# Altium schematic symbol library DIM.SCHLIB: 488 symbols (part 2 of 5)
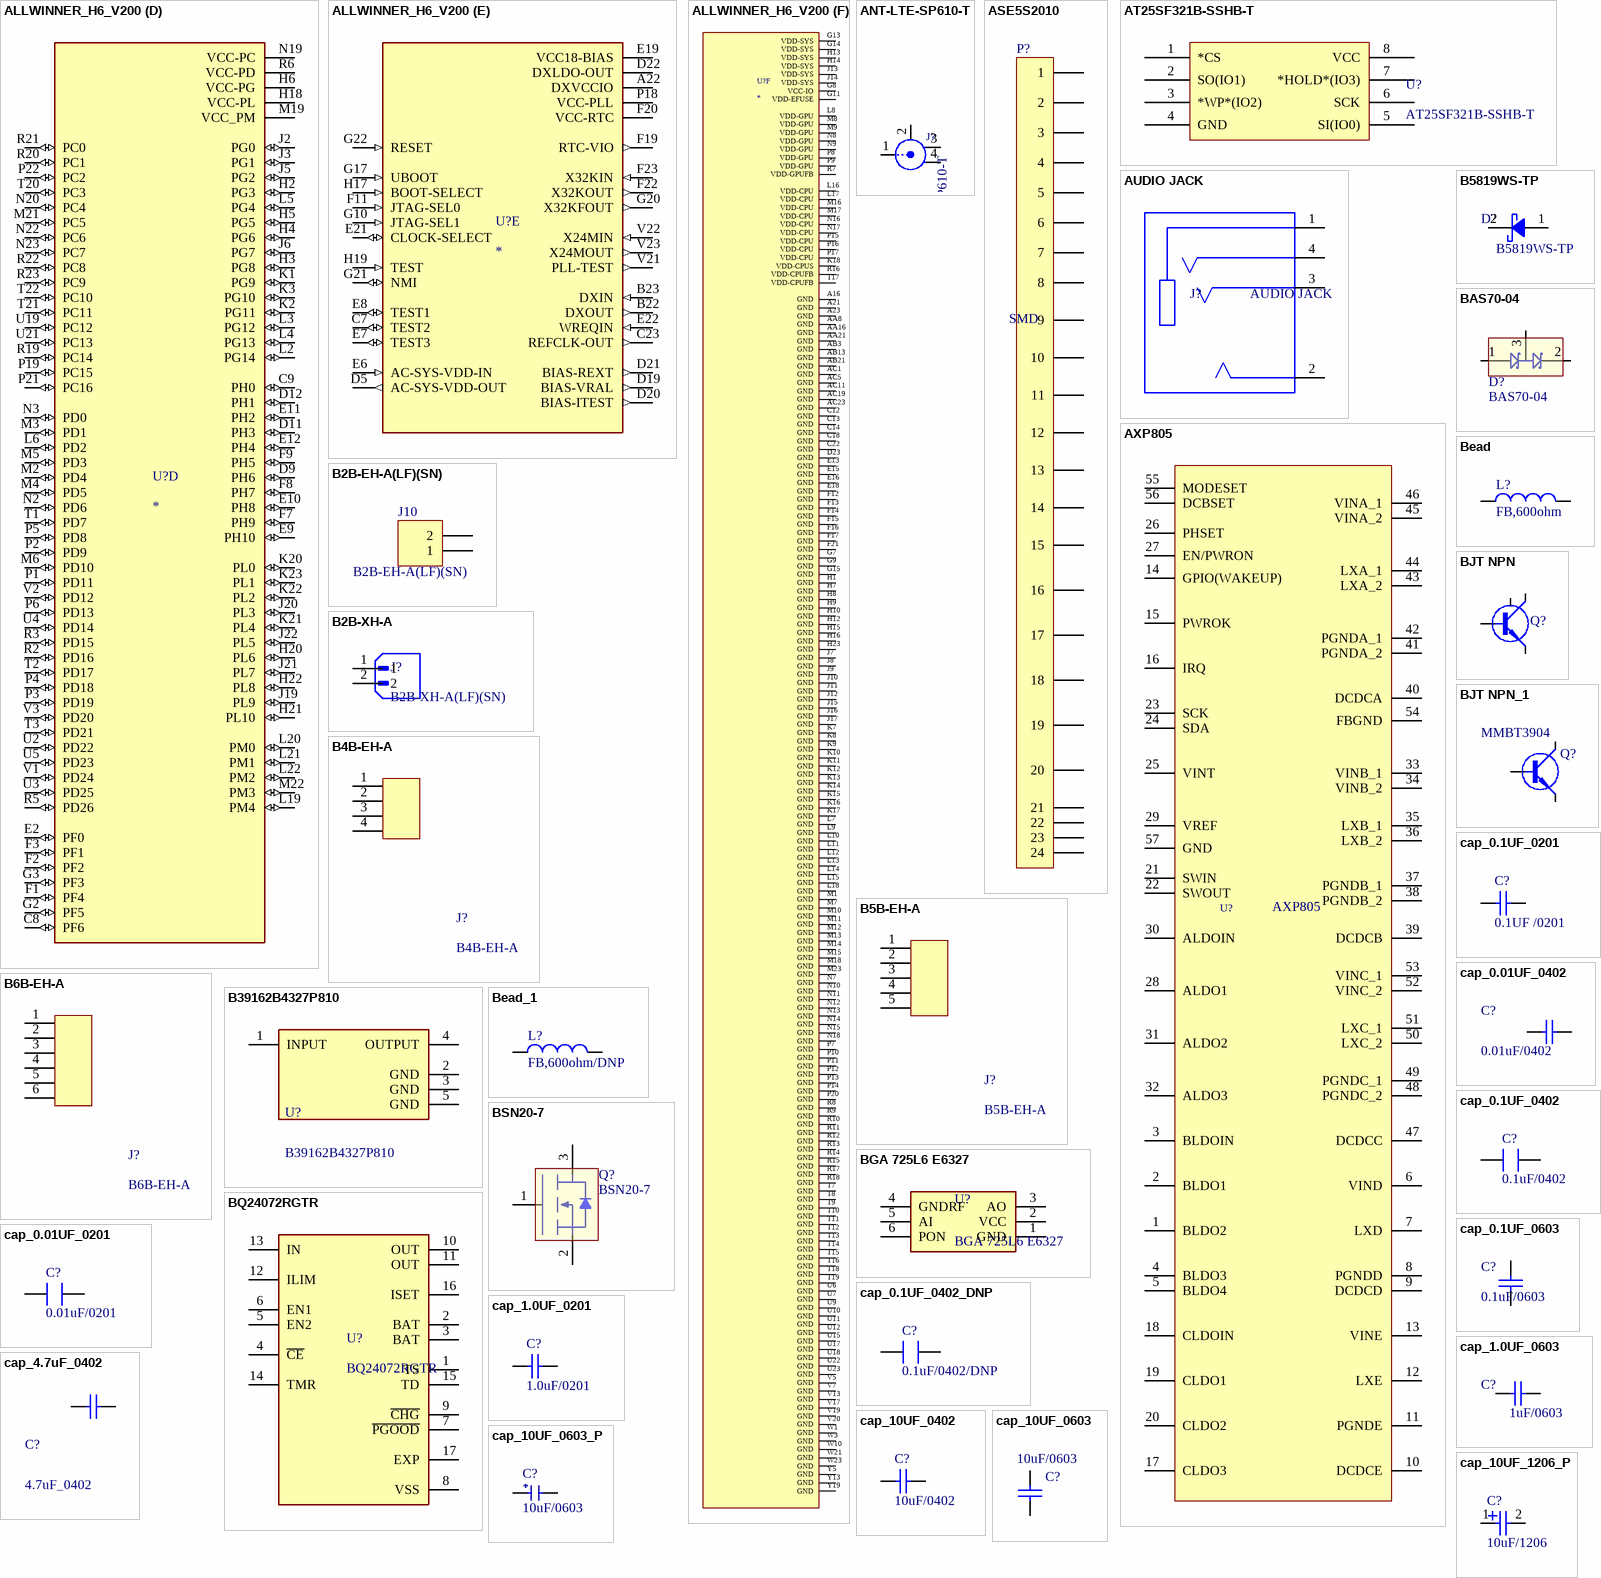
[diagram p26: symbols ALLWINNER_H6_V200 to cap_10UF_1206_P]

## AUDIO JACK
designator J?
AUDIO JACK, 3.5 MM, RT, 4 CONDUC; Manufacturer: CUI Devices; Manufacturer Part Number: SJ2-35894A-SMT-TR; Package: AUDIO JACK; Supplier: Digi-Key; Supplier Part Number: CP-SJ2-35894A-SMT-TR-ND; Value: AUDIO JACK; Operating Temperature: -55°C ~ 155°C
footprint CUI_SJ2-35894A-SMT-TR
pins: 1 SLEEVE, 2 TIP, 3 RING1, 4 RING2

## AXP805
designator U?
Manufacturer: Aliexpress; Package: SMD; Manufacturer Part Number: AXP805; Value: AXP805
pins: 1 BLDO2, 2 BLDO1, 3 BLDOIN, 4 BLDO3, 5 BLDO4, 6 VIND, 7 LXD, 8 PGNDD, 9 DCDCD, 10 DCDCE, 11 PGNDE, 12 LXE, 13 VINE, 14 GPIO(WAKEUP), 15 PWROK, 16 IRQ, 17 CLDO3, 18 CLDOIN, 19 CLDO1, 20 CLDO2, 21 SWIN, 22 SWOUT, 23 SCK, 24 SDA, 25 VINT, 26 PHSET, 27 EN/PWRON, 28 ALDO1, 29 VREF, 30 ALDOIN, 31 ALDO2, 32 ALDO3, 33 VINB_1, 34 VINB_2, 35 LXB_1, 36 LXB_2, 37 PGNDB_1, 38 PGNDB_2, 39 DCDCB, 40 DCDCA, 41 PGNDA_2, 42 PGNDA_1, 43 LXA_2, 44 LXA_1, 45 VINA_2, 46 VINA_1, 47 DCDCC, 48 PGNDC_2, 49 PGNDC_1, 50 LXC_2, 51 LXC_1, 52 VINC_2, 53 VINC_1, 54 FBGND, 55 MODESET, 56 DCBSET, 57 GND

## B2B-EH-A(LF)(SN)
designator J10
CONN HEADER EH TOP 2POS 2.5MM; Manufacturer: JST Sales America Inc.; Pitch - Mating: 0.098" (2.50mm); Style: Board to Cable/Wire; Shrouding: Shrouded - 3 Wall; Number of Positions: 2; Number of Positions Loaded: All; Contact Length - Mating: 0.130" (3.30mm); Contact Length - Post: 0.126" (3.20mm); Material Flammability Rating: UL94 V-0; Current Rating: 3A; Voltage Rating: 250V; Mated Stacking Heights: 8.1mm; Supplier 1: LCSC; RoHS: RoHS Compliant; Category: Connectors, Interconnects; Stock 1: 90599; Pricing 1: 1=0.14, 10=0.131, 100=0.0809, 500=0.06698, 1000=0.05861, 5000=0.05024, 10000=0.04884 (USD); Packaging: Bulk; Part Status: Active; Connector Type: Header; Contact Type: Male Pin; Number of Rows: 1; Row Spacing - Mating: -; Mounting Type: Through Hole; Termination: Press-Fit, Solder; Fastening Type: Friction Lock; Overall Contact Length: -; Insulation Height: 0.236" (6.00mm); Contact Shape: Square; Contact Finish - Mating: Tin; Contact Finish Thickness - Mating: -; Features: -; Ingress Protection: -; Insulation Color: Natural; Contact Finish - Post: Tin; Contact Material: Brass; Insulation Material: Polyamide (PA66), Nylon 6/6; Operating Temperature: -25°C ~ 85°C; Contact Finish Thickness - Post: -; Applications: -; ComponentLink1URL: http://www.jst-mfg.com/product/pdf/eng/eEH.pdf; ComponentLink1Description: http://www.jst-mfg.com/product/pdf/eng/eEH.pdf; Supplier Part Number 1: C160262; Manufacturer Part Number: B2B-EH-A(LF)(SN)
footprint B2B-EH-A(LF)(SN) (Footprint not found)
pins: 1, 2

## B2B-XH-A
designator J?, comment B2B-XH-A(LF)(SN)
Through Hole,P=2.5mm; MF: JST; SPN: C158012; Value: B2B-XH-A(LF)(SN); MP: B2B-XH-A(LF)(SN)
footprint JST_B2B-XH-A
pins: 1, 2

## B4B-EH-A
designator J?
CONN HEADER VERT 4POS 2.5MM; Manufacturer: JST Sales America Inc.; Manufacturer Part Number: B4B-EH-A; Package: TH; Supplier: Digi-Key; Value: B4B-EH-A
footprint B4B-EH-A_JST
pins: 1, 2, 3, 4

## B5B-EH-A
designator J?
CONN HEADER VERT 5POS 2.5MM; Manufacturer: JST Sales America Inc.; Manufacturer Part Number: B5B-EH-A; Package: TH; Supplier: Digi-Key; Supplier Part Number: 455-B5B-EH-A-ND; Value: B5B-EH-A
footprint B5B-EH-A_JST
pins: 1, 2, 3, 4, 5

## B6B-EH-A
designator J?
CONN HEADER VERT 6POS 2.5MM; Manufacturer: JST Sales America Inc.; Manufacturer Part Number: B6B-EH-A; Package: TH; Supplier: Digi-Key; Supplier Part Number: 455-1615-ND; Value: B6B-EH-A
footprint B6B-EH-A_JST
pins: 1, 2, 3, 4, 5, 6

## B5819WS-TP
designator D?
DIODE SCHOTTKY 40V 1A SOD323; Manufacturer: Micro Commercial Co; Manufacturer Part Number: B5819WS-TP; Package: SOD323; Supplier: Digi-Key; Supplier Part Number: B5819WS-TPMSTR-ND; Unit Price: 0.12865; Value: B5819WS-TP
pins: 1, 2

## B39162B4327P810
designator U?
Frequency RF SAW Filter (Sound Acoustic Wave) Bandwidth 5-SMD, No Lead; Manufacturer: Qualcomm (RF360 - A Qualcomm & TDK Joint Venture); Value: B39162B4327P810; Manufacturer Part Number: B39162B4327P810; Package: SMD; Supplier: Digi-Key; Supplier Part Number: 495-7424-2-ND; Operating Temperature: -55°C ~ 125°C; Supplier Availability: Active
footprint B39162B4327P810
pins: 1 INPUT, 2 GND (power), 3 GND (power), 4 OUTPUT, 5 GND (power)

## BAS70-04
designator D?
DIODE ARRAY SCHOTTKY 70V SOT23-3; Manufacturer Part Number: BAS70-04-7-F; Manufacturer: Diodes Incorporated; Package: SOT-23-3; Value: BAS70-04; Supplier: Digi-Key; Supplier Part Number: BAS70-04-FDICT-ND; Operating Temperature: -55°C ~ 125°C; Supplier Availability: Active
footprint BAS70-04-7-F
pins: 1, 2, 3

## Bead
designator L?, comment FB,600ohm
FERRITE BEAD 300 OHM 0805 1LN; Manufacturer: Würth Elektronik; Manufacturer Part Number: 742792031; Package: 0805 (2012 metric); Supplier: Digi-Key; Supplier Part Number: 732-4638-2-ND; Value: FB,600ohm; Operating Temperature: -55°C ~ 125°C
footprint RES 0805/2012 (Chip Resistor, 2-Leads, Body 2.00x1.25mm, IPC High Density)
pins: 1, 2

## Bead_1
designator L?, comment FB,600ohm/DNP
Ferrite Bead 600ohm 0805 2000mA; Manufacturer: Fair-Rite; Manufacturer Part Number: 2508056017Y2; Package: 0805 (2012 metric); Supplier: Mouser; Supplier Part Number: 623-2508056017Y2; Value: FB,600ohm/DNP; Operating Temperature: -55°C ~ 125°C
footprint BEAD
pins: 1, 2

## BGA 725L6 E6327
designator U?
RF Amplifier RF SILICON MMIC; Manufacturer: Infineon Technologies; Value: BGA 725L6 E6327; Manufacturer Part Number: BGA 725L6 E6327; Package: SMD; Supplier: Mouser; Supplier Part Number: 726-BGA725L6E6327
footprint BGA725L6E6327
pins: 1 GND, 2 VCC, 3 AO, 4 GNDRF, 5 AI, 6 PON

## BJT NPN
designator Q?, comment JANTX2N3700UB  (value not drawn)
Bipolar (BJT) Transistor NPN 80V 1A 500mW Surface Mount UB; Manufacturer: Microsemi Corporation; Manufacturer Part Number: JANTX2N3700UB; Package: UB; Supplier: Digi-Key; Supplier Part Number: 1086-2704-ND; Unit Price: $23.17; Value: JANTX2N3700UB
footprint 3-SMD
pins: 1 B, 2 E, 3 C, 4 S

## BJT NPN_1
designator Q?, comment MMBT3904
TRANS NPN 40V 0.2A SOT23; Manufacturer: ON Semiconductor; Manufacturer Part Number: MMBT3904LT3G; Package: SOT-23-3; Supplier: Digi-Key; Supplier Part Number: MMBT3904LT3GOSTR-ND; Value: MMBT3904
footprint MMBT3904
pins: 1 B, 2 E, 3 C

## BQ24072RGTR
designator U?
Standalone 1-cell 1.5-A linear battery charger, Power Path, 4.2-V VBAT and VOUT=VBAT + 225mV; Manufacturer: Texas Instruments; SPN: C140288; MPN: BQ24072RGTR; Package: VQFN-16; Value: BQ24072RGTR; Supplier: LCSC
pins: 1 TS, 2 BAT, 3 BAT, 4 ~{CE}, 5 EN2, 6 EN1, 7 ~{PGOOD}, 8 VSS, 9 ~{CHG}, 10 OUT, 11 OUT, 12 ILIM, 13 IN, 14 TMR, 15 TD, 16 ISET, 17 EXP

## BSN20-7
designator Q?
MOSFET MOSFET BVDSS: 41V-60 41V-60V,SOT23,3K; Manufacturer: Diodes Incorporated; Manufacturer Availability: Active; Manufacturer Part Number: BSN20-7; Package: SOT-723; Supplier Part Number: 621-BSN20-7; Supplier: Mouser; Value: BSN20-7; Operating Temperature: -55°C ~ 150°C (TJ)
pins: 1, 2, 3

## cap_0.01UF_0201
designator C?, comment 0.01uF/0201
CAP CER 10000PF 25V X7R 0201; Manufacturer: Murata Electronics; Manufacturer Part Number: GRM033R71E103KE14D; Value: 0.01uF/0201; Package: 0201 (0603 Metric); Supplier: Digi-Key; Supplier Part Number: 490-14454-2-ND; Operating Temperature: -55°C ~ 125°C
footprint CAP 0201/0603 (Chip Capacitor, 2-Leads, Body 0.60x0.30mm, IPC Medium Density)
pins: 1, 2

## cap_0.1UF_0201
designator C?, comment 0.1UF /0201
CAP CER 0.1UF 25V X6S 0201; Manufacturer: Murata Electronics; Manufacturer Part Number: GRM033C81E104KE14D; Value: 0.1UF /0201; Package: 0201 (0603 Metric); Supplier: Digi-Key; Supplier Part Number: 490-10403-2-ND
footprint CAP 0201/0603 (Chip Capacitor, 2-Leads, Body 0.60x0.30mm, IPC Medium Density)
pins: 1, 2

## cap_0.01UF_0402
designator C?, comment 0.01uF/0402
CAP CER 10000PF 50V X7R 0402; Manufacturer: Murata Electronics; Manufacturer Part Number: CC0402KRX7R9BB103; Value: 0.01uF/0402; Package: 0402 (1005 Metric); Supplier: Digi-Key; Supplier Part Number: 311-1349-2-ND; Operating Temperature: -55°C ~ 125°C
footprint CAP 0402/1005 (Chip Capacitor, 2-Leads, Body 1.02x0.51mm, IPC Medium Density)
pins: 1, 2

## cap_0.1UF_0402
designator C?, comment 0.1uF/0402
CAP CER 0.1UF 50V X7R 0402; Manufacturer: TDK Corporation; Manufacturer Part Number: CGA2B3X7R1H104K050BE; Value: 0.1uF/0402; Package: 0402 (1005 Metric); Supplier: Digi-Key; Supplier Part Number: 445-173614-1-ND; Operating Temperature: -55°C ~ 125°C
footprint CAP 0402/1005 (Chip Capacitor, 2-Leads, Body 1.02x0.51mm, IPC Medium Density)
pins: 1, 2

## cap_0.1UF_0402_DNP
designator C?, comment 0.1uF/0402/DNP
CAP CER 0.1UF 50V X7R 0402; Manufacturer: TDK Corporation; Manufacturer Part Number: CGA2B3X7R1H104K050BE; Value: 0.1uF/0402/DNP; Package: 0402 (1005 Metric); Supplier: Digi-Key; Supplier Part Number: 445-173614-1-ND; Operating Temperature: -55°C ~ 125°C
footprint CAP 0402/1005 (Chip Capacitor, 2-Leads, Body 1.02x0.51mm, IPC Medium Density)
pins: 1, 2

## cap_0.1UF_0603
designator C?, comment 0.1uF/0603
0.1uF, 50v, NP; Manufacturer: KEMET; Manufacturer Part Number: C0603C104K5RACTU; Value: 0.1uF/0603; Package: 0603 (1608 Metric); Supplier: Digi-Key; Supplier Part Number: 399-5089-1-ND
footprint CAPC1608L (Chip Capacitor, Body 1.6x0.8mm, IPC High Density)
pins: 1, 2

## cap_1.0UF_0201
designator C?, comment 1.0uF/0201
Multilayer Ceramic Capacitors MLCC - SMD/SMT 0201 1.0uF 10volts *Derate Voltage/Temp; Manufacturer: Murata Electronics; Manufacturer Part Number: GRM033C81A105ME05D; Value: 1.0uF/0201; Package: 0201 (0603 metric); Supplier: Mouser; Supplier Part Number: 81-GRM033C81A105ME5D
footprint CAP 0201/0603 (Chip Capacitor, 2-Leads, Body 0.60x0.30mm, IPC Medium Density)
pins: 1, 2

## cap_1.0UF_0603
designator C?, comment 1uF/0603
1uF, 50v, NP; Manufacturer: Taiyo Yuden; Manufacturer Part Number: UMK107AB7105KA-T; Value: 1uF/0603; Package: 0603 (1608 Metric); Supplier: Digi-Key; Supplier Part Number: 587-3247-1-ND
footprint CAPC1608L (Chip Capacitor, Body 1.6x0.8mm, IPC High Density)
pins: 1, 2

## cap_4.7uF_0402
designator C?, comment 4.7uF_0402
CAP CER 4.7UF 10V X5R 0402; Manufacturer: Yageo; Manufacturer Part Number: CC0402MRX5R6BB475; Value: 4.7uF_0402; Package: 0402 (1005 Metric); Supplier: Digi-Key; Supplier Part Number: 311-1734-2-ND; Operating Temperature: -55°C ~ 125°C
footprint CAP 0402/1005 (Chip Capacitor, 2-Leads, Body 1.02x0.51mm, IPC Medium Density)
pins: 1, 2

## cap_10UF_0402
designator C?, comment 10uF/0402
0402 (1005 Metric); Manufacturer: Murata Electronics; Manufacturer Part Number: GRM155C80J106ME11D; Value: 10uF/0402; Package: 0402 (1005 Metric); Supplier: Digi-Key; Supplier Part Number: 490-13233-2-ND
footprint CAP 0402/1005 (Chip Capacitor, 2-Leads, Body 1.02x0.51mm, IPC Medium Density)
pins: 1, 2

## cap_10UF_0603
designator C?, comment 10uF/0603
Capacitor; Manufacturer: Murata Electronics North America; Manufacturer Part Number: ZRB18AC81C106ME01L; Package: 0603; Supplier: Digikey; Supplier Part Number: 490-10986-1-ND; Temperature: -55 to 105; Value: 10uF/0603
footprint CAP 0603/1608 (Chip Capacitor, 2-Leads, Body 1.60x0.80mm, IPC High Density)
pins: 1, 2

## cap_10UF_0603_P
designator C?, comment 10uF/0603
10µF Molded Tantalum Capacitors 10V; Manufacturer: AVX Corporation; Manufacturer Part Number: TACL106K010XTA; Value: 10uF/0603; Package: 0603 (1608 Metric); Supplier: Digi-Key; Supplier Part Number: 478-8775-1-ND; Operating Temperature: -55°C ~ 125°C; Supplier Availability: Active
footprint 0603 Polar
pins: 1 +, 2 -

## cap_10UF_1206_P
designator C?, comment 10uF/1206
10uF, 20v, Tantlum, Polar; Manufacturer: AVX Corporation; Manufacturer Part Number: F931D106MAA; Value: 10uF/1206; Package: 1206 (3216 Metric); Supplier: Digi-Key; Supplier Part Number: 478-8275-1-ND
footprint CAPC3216 (Chip Capacitor, Body 3.2x1.6mm, IPC High Density)
pins: 1, 2

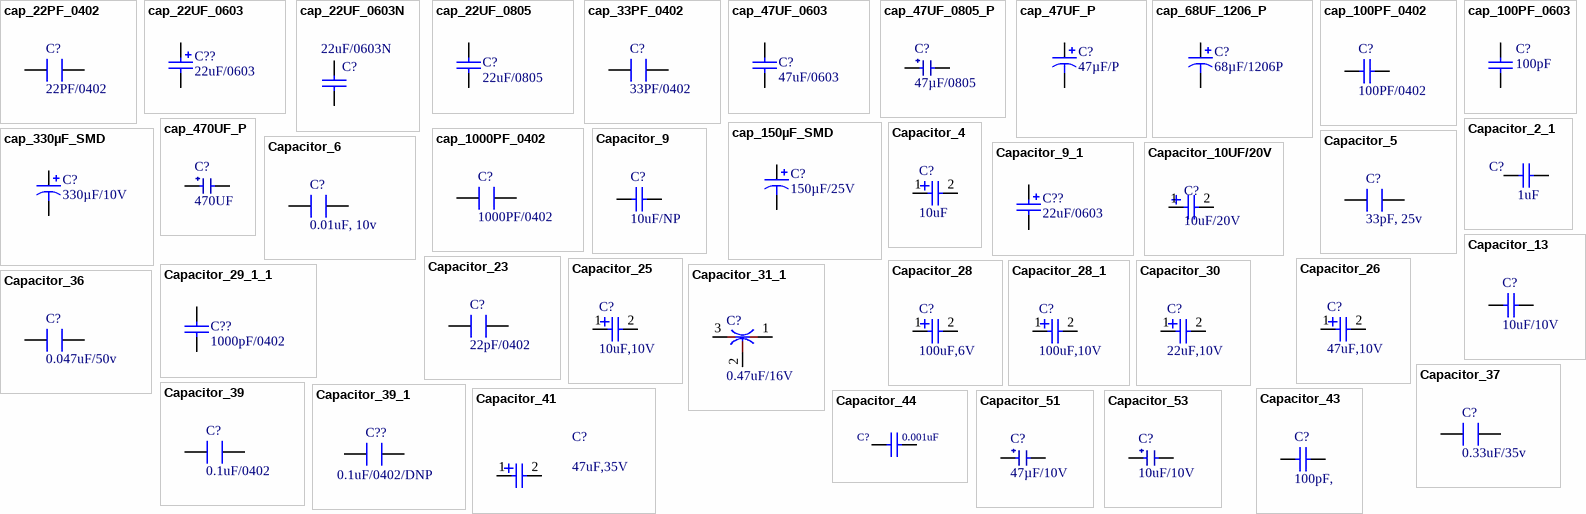
[diagram p5: symbols cap_22PF_0402 to Capacitor_53]

## cap_22PF_0402
designator C?, comment 22PF/0402
CAP CER 22PF 50V C0G/NP0 0402; Manufacturer: KEMET; Manufacturer Part Number: C0402C220K5GACTU; Value: 22PF/0402; Package: 0402 (1005 Metric); Supplier: Digi-Key; Supplier Part Number: 399-7775-2-ND; Operating Temperature: -55°C ~ 125°C
footprint CAP 0402/1005 (Chip Capacitor, 2-Leads, Body 1.02x0.51mm, IPC Medium Density)
pins: 1, 2

## cap_22UF_0603
designator C??, comment 22uF/0603
CAP TANT 22UF 20% 10V 0603; Manufacturer Part Number: F981A226MMALZT; Manufacturer: AVX Corporation; Package: 0603 (1608 Metric); Supplier Part Number: 478-10724-2-ND; Supplier: Digi-Key; Operating Temperature: -55°C ~ 125°C; Value: 22uF/0603
footprint CAPC1608L (Chip Capacitor, Body 1.6x0.8mm, IPC High Density)
pins: 1, 2
1 alternate drawing of the same symbol

## cap_22UF_0603N
designator C?, comment 22uF/0603N
Capacitor; Manufacturer: Murata Electronics; Manufacturer Part Number: ZRB18AR60J476ME01L; Package: 0603 (1608 metric); Supplier: Mouser; Supplier Part Number: 81-ZRB18AR60J476ME1L; Temperature: -55°C ~ 85°C; Value: 22uF/0603N
footprint CAP 0603/1608 (Chip Capacitor, 2-Leads, Body 1.60x0.80mm, IPC High Density)
pins: 1, 2

## cap_22UF_0805
designator C?, comment 22uF/0805
Capacitor; Manufacturer: Samsung Electro-Mechanics; Manufacturer Part Number: CL21A226MAQNNNE; Package: 0805 (2012 Metric); Supplier: Digikey; Supplier Part Number: 1276-2908-2-ND; Temperature: -55°C ~ 85°C; Value: 22uF/0805
footprint RESC2012L (Chip Resistor, Body 2.0x1.3mm, IPC High Density)
pins: 1, 2

## cap_33PF_0402
designator C?, comment 33PF/0402
33pF, 25v, NP; Manufacturer: Yageo; Manufacturer Part Number: CC0402JRNPO9BN330; Value: 33PF/0402; Package: 0402 (1005 Metric); Supplier: Digi-Key; Supplier Part Number: 311-1020-2-ND; Operating Temperature: -55°C ~ 125°C
footprint CAP 0402/1005 (Chip Capacitor, 2-Leads, Body 1.02x0.51mm, IPC Medium Density)
pins: 1, 2

## cap_47UF_0603
designator C?, comment 47uF/0603
Capacitor; Manufacturer: Murata Electronics; Manufacturer Part Number: ZRB18AR60J476ME01L; Package: 0603 (1608 metric); Supplier: Mouser; Supplier Part Number: 81-ZRB18AR60J476ME1L; Temperature: -55°C ~ 85°C; Value: 47uF/0603
footprint CAPC1608L (Chip Capacitor, Body 1.6x0.8mm, IPC High Density)
pins: 1, 2

## cap_47UF_0805_P
designator C?, comment 47µF/0805
CAP TANT 47UF 10V 20% 0805; Manufacturer: AVX Corporation; Manufacturer Part Number: F981A476MSA; Value: 47µF/0805; Package: 0805 (2012 Metric); Supplier: Digi-Key; Supplier Part Number: 478-8652-2-ND; Operating Temperature: -55°C ~ 125°C; Supplier Availability: Active
footprint CAPC2012-P (Chip Capacitor, Body 2.0x1.3mm, IPC High Density)
pins: 1 +, 2 -

## cap_47UF_P
designator C?, comment 47µF/P
CAP TANT 47UF 20% 10V 0805; Manufacturer: AVX Corporation; Manufacturer Part Number: TLNN476M010R6000; Package: 0805 (2012 Metric); Supplier: Digi-Key; Supplier Part Number: 478-6613-1-ND; Temperature: -40°C ~ 105°C; Value: 47µF/P
footprint CAP 0805/2012 -P (Chip Capacitor, 2-Leads, Body 2.00x1.20mm, IPC High Density)
pins: 1, 2
1 alternate drawing of the same symbol

## cap_68UF_1206_P
designator C?, comment 68µF/1206P
CAP TANT 68UF 20% 10V 1206; Manufacturer: AVX Corporation; Manufacturer Part Number: TLJA686M010R1500; Package: SMD/SMT; Supplier: Digi-Key; Supplier Part Number: 478-4925-6-ND; Temperature: -55°C ~  125°C; Value: 68µF/1206P
footprint CAP 1206/3216-P (Chip Capacitor, 2-Leads, Body 3.25x1.60mm, IPC Medium Density)
pins: 1, 2
1 alternate drawing of the same symbol

## cap_100PF_0402
designator C?, comment 100PF/0402
CAP CER 100PF 25V C0G/NP0 0402; Manufacturer: KEMET; Manufacturer Part Number: C0402C101J3GACTU; Value: 100PF/0402; Package: 0402 (1005 Metric); Supplier: Digi-Key; Supplier Part Number: 399-1022-2-ND
footprint CAP 0402/1005 (Chip Capacitor, 2-Leads, Body 1.02x0.51mm, IPC Medium Density)
pins: 1, 2

## cap_100PF_0603
designator C?, comment value 100pF  (hidden comment: Capacitor)
Manufacturer: Murata Electronics North America; Manufacturer Part Number: GRM1885C1H101JA01D; Package: 0603 (1608 Metric); Supplier: DigiKey; Supplier Part Number: 490-1427-2-ND; Temperature: -55°C ~ 125°C
footprint CAP 0603/1608 (Chip Capacitor, 2-Leads, Body 1.60x0.80mm, IPC High Density)
pins: 1, 2

## cap_150µF_SMD
designator C?, comment 150µF/25V
CAP ALUM 150UF 20% 25V SMD; Manufacturer: KEMET; Manufacturer Part Number: EDT157M025S9MAA; Value: 150µF/SMD; Package: Radial, Can - SMD; Supplier: Digi-Key; Supplier Part Number: EDT157M025S9MAA-ND; Temperature: -40°C ~ 125°C
pins: 1, 2
1 alternate drawing of the same symbol

## cap_330µF_SMD
designator C?, comment 330µF/10V
Polarized Capacitor (Axial); Manufacturer: KEMET; Manufacturer Part Number: EDT337M010S9MAA; Value: 330µF/SMD; Package: Radial, Can - SMD; Supplier: Digi-Key; Supplier Part Number: 493-2145-2-ND; Temperature: -40°C ~ 125°C
pins: 1, 2
1 alternate drawing of the same symbol

## cap_470UF_P
designator C?, comment 470UF
CAP ALUM 470UF 20% 10V SMD; Manufacturer: Panasonic Electronic Components; Manufacturer Part Number: EEE-FTA471XAP; Value: 470UF; Package: 0.260" L x 0.260" W (6.60mm x 6.60mm); Supplier: Digi-Key; Supplier Part Number: P15094TR-ND; Operating Temperature: -55°C ~ 125°C
pins: 1 +, 2 -

## cap_1000PF_0402
designator C?, comment 1000PF/0402
CAP CER 1000PF 16V X7R 0402; Manufacturer: Yageo; Manufacturer Part Number: CC0402KRX7R7BB102; Value: 1000PF/0402; Package: 0402 (1005 Metric); Supplier: Digi-Key; Supplier Part Number: 311-1352-2-ND; Operating Temperature: -55°C ~ 125°C
footprint CAP 0402/1005 (Chip Capacitor, 2-Leads, Body 1.02x0.51mm, IPC Medium Density)
pins: 1, 2

## Capacitor_2_1
designator C?, comment 1uF
1uF, 50v, NP; Manufacturer: Taiyo Yuden; Manufacturer Part Number: UMK107AB7105KA-T; Value: 1uF; Package: 0603 (1608 Metric); Supplier: Digi-Key; Supplier Part Number: 587-3247-1-ND
footprint CAPC1608L (Chip Capacitor, Body 1.6x0.8mm, IPC High Density)
pins: 1, 2

## Capacitor_4
designator C?, comment 10uF
10uF, 20v, Tantlum, Polar; Manufacturer: AVX Corporation; Manufacturer Part Number: F931D106MAA; Value: 10uF; Package: 1206 (3216 Metric); Supplier: Digi-Key; Supplier Part Number: 478-8275-1-ND
footprint CAPC3216 (Chip Capacitor, Body 3.2x1.6mm, IPC High Density)
pins: 1, 2

## Capacitor_5
designator C?, comment 33pF, 25v
33pF, 25v, NP; Manufacturer: AVX; Manufacturer Part Number: 06033A330FAT2A; Value: 33pF, 25v; Package: 0603 (1608 metric); Supplier: Mouser; Supplier Part Number: 581-06033A330FAT2A; Operating Temperature: -55°C ~ 125°C
footprint CAPC1608L (Chip Capacitor, Body 1.6x0.8mm, IPC High Density)
pins: 1, 2

## Capacitor_6
designator C?, comment 0.01uF, 10v
0.01uF, 10v, NP; Manufacturer: AVX; Manufacturer Part Number: 0603ZC103KAT2A; Value: 0.01uF, 10v; Package: 0603 (1608 metric); Supplier: Mouser; Supplier Part Number: 581-0603ZC103K; Operating Temperature: -55°C ~ 125°C
footprint CAPC1608L (Chip Capacitor, Body 1.6x0.8mm, IPC High Density)
pins: 1, 2

## Capacitor_9
designator C?, comment 10uF/NP
10uF, 6.3v, NP; Manufacturer: Murata Electronics; Manufacturer Part Number: GRM21BR70J106KA73L; Value: 10uF/NP; Package: 0805 (2012 metric); Supplier: Mouser; Supplier Part Number: 81-GRM21BR70J106KA3L
footprint CAPC2012 (Chip Capacitor, Body 2.0x1.3mm, IPC High Density)
pins: 1, 2

## Capacitor_9_1
designator C??, comment 22uF/0603
CAP TANT 22UF 20% 10V 0603; Manufacturer Part Number: F981A226MMALZT; Manufacturer: AVX Corporation; Package: 0603 (1608 Metric); Supplier Part Number: 478-10724-2-ND; Supplier: Digi-Key; Operating Temperature: -55°C ~ 125°C; Value: 22uF/0603
footprint CAPC1608L (Chip Capacitor, Body 1.6x0.8mm, IPC High Density)
pins: 1, 2
1 alternate drawing of the same symbol

## Capacitor_10UF/20V
designator C?, comment 10uF/20V
CAP TANT 10UF 20% 20V 1206; Manufacturer: KEMET; Manufacturer Part Number: T494A106M020AT; Value: 10uF/20V; Package: 1206 (3216 Metric); Supplier: Digikey; Supplier Part Number: 399-5157-2-ND
footprint CAPC3216 (Chip Capacitor, Body 3.2x1.6mm, IPC High Density)
pins: 1, 2

## Capacitor_13
designator C?, comment 10uF/10V
10uF, 10v; Manufacturer Part Number: C0805C106M8RACTU; Manufacturer: KEMET; Value: 10uF/10V; Package: 0805 (2012 Metric); Supplier Part Number: 399-7413-6-ND; Supplier: Digi-Key
footprint CAPC2012 (Chip Capacitor, Body 2.0x1.3mm, IPC High Density)
pins: 1, 2

## Capacitor_23
designator C?, comment 22pF/0402
CAP CER 22PF 50V C0G/NP0 0402; Manufacturer: KEMT; Manufacturer Part Number: C0402C220K5GACTU; Value: 22pF/0402; Package: 0603 (1608 Metric); Supplier: Digi-Key; Supplier Part Number: 399-7775-2-ND; Operating Temperature: -55°C ~ 125°C
footprint CAPC1005L (Chip Capacitor, Body 1.0x0.5mm, IPC High Density)
pins: 1, 2

## Capacitor_25
designator C?, comment 10uF,10V
Tantalum Capacitors - Solid SMD 10volts 10uF 20%; Manufacturer: AVX Corporation; Manufacturer Part Number: TPSP106M010R2000; Value: 10uF,10V; Package: 0805 (2012 metric); Supplier: Mouser; Supplier Part Number: 581-TPSP106M010R2000
footprint CAPC2012-P (Chip Capacitor, Body 2.0x1.3mm, IPC High Density)
pins: 1, 2

## Capacitor_26
designator C?, comment 47uF,10V
Tantalum Capacitors - Solid SMD 10volts 47uF 20% ESR=3200; Manufacturer: AVX Corporation; Manufacturer Part Number: TLJR476M010R3200; Value: 47uF,10V; Package: 0805 (2012 metric); Supplier: Mouser; Supplier Part Number: 581-TLJR476M10R3200
footprint CAPC2012-P (Chip Capacitor, Body 2.0x1.3mm, IPC High Density)
pins: 1, 2

## Capacitor_28
designator C?, comment 100uF,6V
Tantalum Capacitors - Solid SMD 6V 100uF 20% ESR = 5400mOhm; Manufacturer: AVX Corporation; Manufacturer Part Number: TLJP107M006S5400; Value: 100uF,6V; Package: 0805 (2012 metric); Supplier: Mouser; Supplier Part Number: 581-TLJP107M006S5400
footprint CAPC2012-P (Chip Capacitor, Body 2.0x1.3mm, IPC High Density)
pins: 1, 2

## Capacitor_28_1
designator C?, comment 100uF,10V
CAP TANT 100UF 10V 20% 1206; Manufacturer: AVX Corporation; Manufacturer Part Number: TLJA107M010R1400; Value: 100uF,10V; Package: 1206 (3216 metric); Supplier: Digi-Key; Supplier Part Number: 478-5651-1-ND
footprint CAPC3216 (Chip Capacitor, Body 3.2x1.6mm, IPC High Density)
pins: 1, 2

## Capacitor_29_1_1
designator C??, comment 1000pF/0402
CAP CER 1000PF 50V X7R 0402; Manufacturer: Yageo; Manufacturer Part Number: CC0402KRX7R9BB102; Value: 1000pF/0402; Package: 0402 (1005 Metric); Supplier: Digi-Key; Supplier Part Number: 311-1036-2-ND; Operating Temperature: -55°C ~ 125°C
footprint CAPC1005L (Chip Capacitor, Body 1.0x0.5mm, IPC High Density)
pins: 1, 2

## Capacitor_30
designator C?, comment 22uF,10V
Tantalum Capacitors - Solid SMD 10volts 22uF 20% ESR=3800; Manufacturer: AVX Corporation; Manufacturer Part Number: TLJN226M010R3800; Value: 22uF,10V; Package: 0805 (2012 Metric); Supplier: Mouser; Supplier Part Number: 581-TLJN226M010R3800
footprint CAPC2012-P (Chip Capacitor, Body 2.0x1.3mm, IPC High Density)
pins: 1, 2

## Capacitor_31_1
designator C?, comment 0.47uF/16V
FEEDTHRU 0.47UF 16V; Manufacturer: Murata Electronics North America; Manufacturer Part Number: NFM21PC474R1C3D; Value: 0.47uF/16V; Package: 0805 (2012 Metric), 3 PC Pad; Supplier: Digi-Key; Supplier Part Number: 490-2537-1-ND; Operating Temperature: -55°C ~ 125°C
footprint NFM21PC
pins: 1, 2, 3

## Capacitor_36
designator C?, comment 0.047uF/50v
0.047uF/50v/NP; Manufacturer: KEMET; Manufacturer Part Number: C0603C473J5RACTU; Value: 0.047uF/50v; Package: 0603 (1608 Metric); Supplier: Digi-Key; Supplier Part Number: 399-7930-1-ND; Operating Temperature: -55°C ~ 125°C
footprint CAPC1608L (Chip Capacitor, Body 1.6x0.8mm, IPC High Density)
pins: 1, 2

## Capacitor_37
designator C?, comment 0.33uF/35v
0.33uF/35v/NP; Manufacturer: TDK Corporation; Manufacturer Part Number: CGA3E1X7R1V334K080AC; Value: 0.33uF/35v; Package: 0603 (1608 Metric); Supplier: Digi-Key; Supplier Part Number: 445-6927-1-ND; Operating Temperature: -55°C ~ 125°C
footprint CAPC1608L (Chip Capacitor, Body 1.6x0.8mm, IPC High Density)
pins: 1, 2

## Capacitor_39
designator C?, comment 0.1uF/0402
CAP CER 0.1UF 50V X7R 0402; Manufacturer: TDK Corporation; Manufacturer Part Number: CGA2B3X7R1H104K050BE; Value: 0.1uF/0402; Package: 0402 (1005 Metric); Supplier: Digi-Key; Supplier Part Number: 445-173614-1-ND; Operating Temperature: -55°C ~ 125°C
footprint CAPC1005L (Chip Capacitor, Body 1.0x0.5mm, IPC High Density)
pins: 1, 2

## Capacitor_39_1
designator C??, comment 0.1uF/0402/DNP
CAP CER 0.1UF 50V X7R 0402; Manufacturer: TDK Corporation; Manufacturer Part Number: CGA2B3X7R1H104K050BE; Value: 0.1uF/0402/DNP; Package: 0402 (1005 Metric); Supplier: Digi-Key; Supplier Part Number: 445-173614-1-ND; Operating Temperature: -55°C ~ 125°C
footprint CAPC1005L (Chip Capacitor, Body 1.0x0.5mm, IPC High Density)
pins: 1, 2

## Capacitor_41
designator C?, comment 47uF,35V
CAP TANT 47UF 35V 10% 2917; Manufacturer: AVX Corporation; Manufacturer Part Number: TPSE476K035R0200; Value: 47uF,35V; Package: 2917 (7343 Metric); Supplier: Digi-Key; Supplier Part Number: 478-3109-2-ND
footprint CAPC2917
pins: 1, 2

## Capacitor_43
designator C?, comment 100pF,
CAP CER 100PF 25V C0G/NP0 0402; Manufacturer: KEMET; Manufacturer Part Number: C0402C101J3GACTU; Value: 100pF,; Package: 0402 (1005 Metric); Supplier: Digi-Key; Supplier Part Number: 399-1022-2-ND
footprint CAPC1005L (Chip Capacitor, Body 1.0x0.5mm, IPC High Density)
pins: 1, 2

## Capacitor_44
designator C?, comment 0.001uF
CAP CER 1000PF 50V X7R 0603; Manufacturer: Murata Electronics North America; Manufacturer Part Number: GCM155R71H102KA37D; Package: 0402 (1005 Metric); Supplier: DigiKey; Supplier Part Number: 490-4761-2-ND; Temperature: -55°C ~ 125°C; Value: 0.001uF
footprint CAPC1005L (Chip Capacitor, Body 1.0x0.5mm, IPC High Density)
pins: 1, 2

## Capacitor_51
designator C?, comment 47µF/10V
CAP TANT 47UF 10V 20% 0805; Manufacturer: AVX Corporation; Manufacturer Part Number: F981A476MSA; Value: 47µF/10V; Package: 0805 (2012 Metric); Supplier: Digi-Key; Supplier Part Number: 478-8652-2-ND; Operating Temperature: -55°C ~ 125°C; Supplier Availability: Active
footprint CAPC2012-P (Chip Capacitor, Body 2.0x1.3mm, IPC High Density)
pins: 1 +, 2 -

## Capacitor_53
designator C?, comment 10uF/10V
10µF Molded Tantalum Capacitors 10V; Manufacturer: AVX Corporation; Manufacturer Part Number: TACL106K010XTA; Value: 10uF/10V; Package: 0603 (1608 Metric); Supplier: Digi-Key; Supplier Part Number: 478-8775-1-ND; Operating Temperature: -55°C ~ 125°C; Supplier Availability: Active
footprint 0603 Polar
pins: 1 +, 2 -

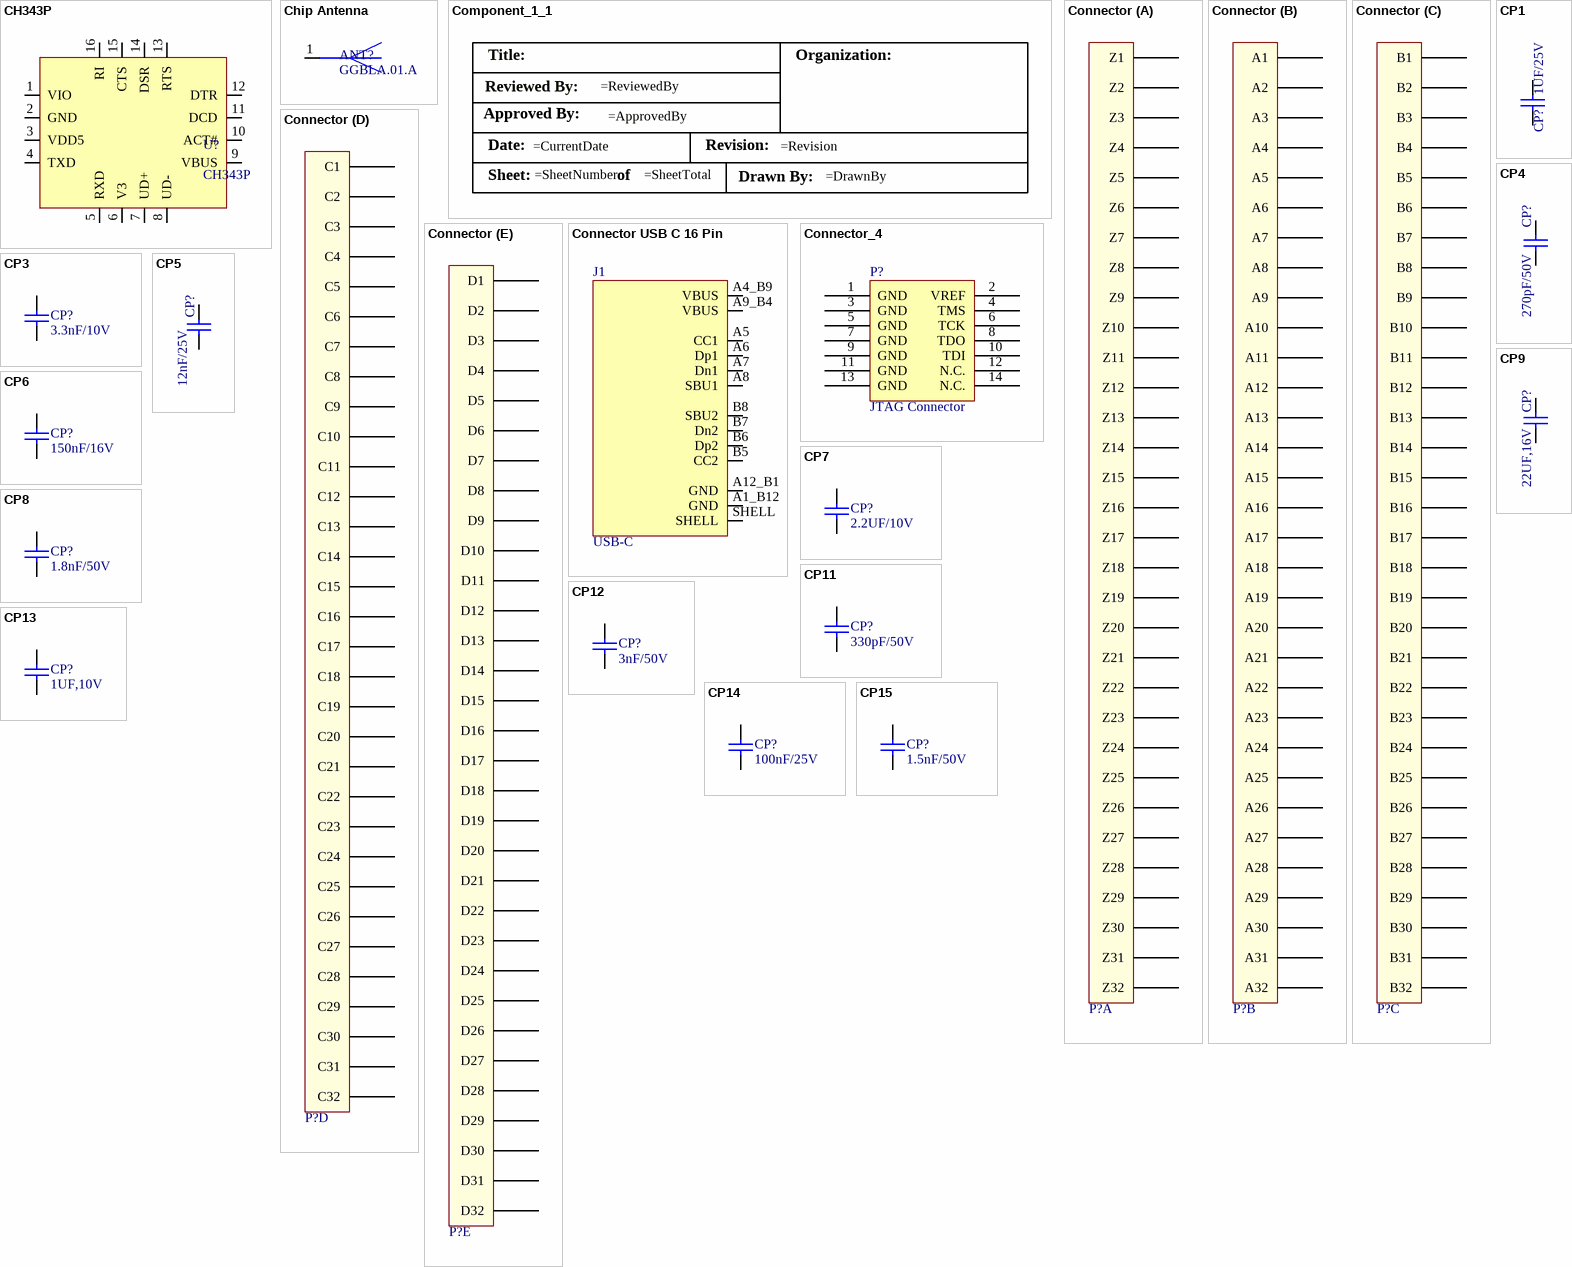
[diagram p6: symbols CH343P to CP15]

## CH343P
designator U?
TQFN-16-EP(3x3) USB ICs ROHS; Manufacturer: WCH(Jiangsu Qin Heng); SPN: C2846043; MPN: CH343P; Package: TQFN-16; Supplier: LCSC; Value: CH343P
pins: 1 VIO, 2 GND, 3 VDD5, 4 TXD, 5 RXD, 6 V3, 7 UD+, 8 UD-, 9 VBUS, 10 ACT#, 11 DCD, 12 DTR, 13 RTS, 14 DSR, 15 CTS, 16 RI

## Chip Antenna
designator ANT?, comment GGBLA.01.A
RF ANT 1.561GHZ/1.575GHZ CHIP; Manufacturer: Taoglas Limited; Manufacturer Part Number: GGBLA.01.A; package: SMD; Supplier: Digikey; Supplier Part Number: 931-1301-2-ND; Temperature: -55 to 155; value: GGBLA.01.A
footprint GGBLA.01.A
pins: 1

## Component_1_1
designator *?, comment Component_1  (value not drawn)
text: Title:; Organization:; Reviewed By:; Approved By:; Date:; Revision:; Sheet:; of; Drawn By:

## Connector
designator P?, comment VME Connector  (value not drawn)
VME_5x32; Manufacturer: HARTING; Manufacturer Part Number: 02011602101; Value: VME Connector; Supplier: Mouser; Supplier Part Number: 617-02-01-160-2101; Package: Non Standard; Operating Temperature: -55°C ~ 125°C
footprint 160M-RT-ANGLE
part A pins: Z1, Z2, Z3, Z4, Z5, Z6, Z7, Z8, Z9, Z10, Z11, Z12, Z13, Z14, Z15, Z16, Z17, Z18, Z19, Z20, Z21, Z22, Z23, Z24, Z25, Z26, Z27, Z28, Z29, Z30, Z31, Z32
part B pins: A1, A2, A3, A4, A5, A6, A7, A8, A9, A10, A11, A12, A13, A14, A15, A16, A17, A18, A19, A20, A21, A22, A23, A24, A25, A26, A27, A28, A29, A30, A31, A32
part C pins: B1, B2, B3, B4, B5, B6, B7, B8, B9, B10, B11, B12, B13, B14, B15, B16, B17, B18, B19, B20, B21, B22, B23, B24, B25, B26, B27, B28, B29, B30, B31, B32
part D pins: C1, C2, C3, C4, C5, C6, C7, C8, C9, C10, C11, C12, C13, C14, C15, C16, C17, C18, C19, C20, C21, C22, C23, C24, C25, C26, C27, C28, C29, C30, C31, C32
part E pins: D1, D2, D3, D4, D5, D6, D7, D8, D9, D10, D11, D12, D13, D14, D15, D16, D17, D18, D19, D20, D21, D22, D23, D24, D25, D26, D27, D28, D29, D30, D31, D32

## Connector USB C 16 Pin
designator J1, comment USB-C
3A 1 Surface Mount，Right Angle 16P Female -40℃~+85℃ Gold Copper Type-C SMD USB Connectors ROHS; MPN: TYPEC-304-ACP16; Manufacturer: XUNPU; SPN: C2982555; Supplier: LCSC; Value: USB-C
footprint USB-C-SMD_TYPE-C-16P-1
pins: A1_B12 GND, A4_B9 VBUS, A5 CC1, A6 Dp1, A7 Dn1, A8 SBU1, A9_B4 VBUS, A12_B1 GND, B5 CC2, B6 Dp2, B7 Dn2, B8 SBU2, SHELL

## Connector_4
designator P?, comment JTAG Connector
JTAG-FPGA; Manufacturer: Sullins Connector Solutions; Manufacturer Part Number: SBH11-PBPC-D07-ST-BK; Value: JTAG Connector; Supplier: Digi-Key; Supplier Part Number: S9170-ND; Package: SMD
footprint JATG-14_SMD (Manufacturing No:61201420621)
pins: 1 GND, 2 VREF, 3 GND, 4 TMS, 5 GND, 6 TCK, 7 GND, 8 TDO, 9 GND, 10 TDI, 11 GND, 12 N.C., 13 GND, 14 N.C.

## CP1
designator CP?, comment 1UF/25V
CAP CER 1UF 25V X7R 0805; Manufacturer: Murata Electronics North America; Manufacturer Part Number: GRM219R71E105KA88D; Package: 0805 (2012 Metric); Supplier: Digi-Key; Supplier Part Number: 490-5899-1-ND; Unit Price: *; Value: 1UF/25V
footprint CAPC2012 (Chip Capacitor, Body 2.0x1.3mm, IPC High Density)
pins: 1, 2

## CP3
designator CP?, comment 3.3nF/10V
3.3nF/10V/X7R; Manufacturer: Wurth Electronics Inc.; Manufacturer Part Number: 885012006016; Package: 0603 (1608 Metric); Supplier: Digi-Key; Supplier Part Number: 732-7759-6-ND; Unit Price: *; Value: 3.3nF/10V
footprint CAPC1608L (Chip Capacitor, Body 1.6x0.8mm, IPC High Density)
pins: 1, 2

## CP4
designator CP?, comment 270pF/50V
CAP CER 270PF 50V C0G/NP0 0805; Manufacturer: Samsung Electro-Mechanics; Manufacturer Part Number: CL21C271JBANFNC; Package: 0805 (2012 Metric); Supplier: Digi-Key; Supplier Part Number: 1276-2626-1-ND; Unit Price: *; Value: 270pF/50V
footprint CAPC2012 (Chip Capacitor, Body 2.0x1.3mm, IPC High Density)
pins: 1, 2

## CP5
designator CP?, comment 12nF/25V
CAP CER 0.012UF 25V C0G/NP0 0603; Manufacturer: KEMET; Manufacturer Part Number: C0603C123J3GACTU; Package: 0603 (1608 Metric); Supplier: Digi-Key; Supplier Part Number: 399-8997-1-ND; Unit Price: *; Value: 12nF/25V
footprint CAPC1608L (Chip Capacitor, Body 1.6x0.8mm, IPC High Density)
pins: 1, 2

## CP6
designator CP?, comment 150nF/16V
Multilayer Ceramic Capacitors MLCC - SMD/SMT 0805 0.15uF 16volts X7R 10%; Manufacturer: Murata Electronics; Manufacturer Part Number: GRM21BR71C154KA01L; Package: 0805 (2012 metric); Supplier: Mouser; Supplier Part Number: 81-GRM40X154K16L; Unit Price: *; Value: 150nF/16V
footprint CAPC2012 (Chip Capacitor, Body 2.0x1.3mm, IPC High Density)
pins: 1, 2

## CP7
designator CP?, comment 2.2UF/10V
CAP CER 2.2UF 10V X7R 0805; Manufacturer: Murata Electronics North America; Manufacturer Part Number: GRM21BR71A225KA01L; Package: 0805 (2012 Metric); Supplier: Digi-Key; Supplier Part Number: 490-1696-1-ND; Unit Price: *; Value: 2.2UF/10V
footprint CAPC2012 (Chip Capacitor, Body 2.0x1.3mm, IPC High Density)
pins: 1, 2

## CP8
designator CP?, comment 1.8nF/50V
Multilayer Ceramic Capacitors MLCC - SMD/SMT 0.0018uF 50Volts 5%; Manufacturer: Murata Electronics; Manufacturer Part Number: GRM1885C1H182JA01J; Package: 0603 (1608 metric); Supplier: Mouser; Supplier Part Number: 81-GRM1885C1H182JA1J; Unit Price: *; Value: 1.8nF/50V
footprint CAPC1608L (Chip Capacitor, Body 1.6x0.8mm, IPC High Density)
pins: 1, 2

## CP9
designator CP?, comment 22UF,16V
CAP CER 22UF 16V X7R 1210; Manufacturer: Murata Electronics North America; Manufacturer Part Number: GRM32ER71C226KE18L; Package: 1210 (3225 Metric); Supplier: Digi-Key; Supplier Part Number: 490-4524-1-ND; Unit Price: *; Value: 22UF,16V
footprint CAPC3225L (Chip Capacitor, Body 3.2x2.5mm, IPC High Density)
pins: 1, 2

## CP11
designator CP?, comment 330pF/50V
330pF ±5% 50V Ceramic Capacitor C0G, NP0 0805 (2012 Metric); Manufacturer: Samsung Electro-Mechanics; Manufacturer Part Number: CL21C331JBANFNC; Package: 0805 (2012 Metric); Supplier: Digi-Key; Supplier Part Number: 1276-2645-1-ND; Unit Price: *; Value: 330pF/50V
footprint CAPC2012 (Chip Capacitor, Body 2.0x1.3mm, IPC High Density)
pins: 1, 2

## CP12
designator CP?, comment 3nF/50V
CAP CER 300PF 50V C0G/NP0 0805; Manufacturer: AVX Corporation; Manufacturer Part Number: 08055A301FAT2A; Package: 0805 (2012 Metric); Supplier: Digi-Key; Supplier Part Number: 478-6220-1-ND; Unit Price: *; Value: 3nF/50V
footprint CAPC2012 (Chip Capacitor, Body 2.0x1.3mm, IPC High Density)
pins: 1, 2

## CP13
designator CP?, comment 1UF,10V
CAP CER 1UF 10V X7R 0805; Manufacturer: Murata Electronics North America; Manufacturer Part Number: GRM21BR71A105KA01L; Package: 0805 (2012 Metric); Supplier: Digi-Key; Supplier Part Number: 490-1695-1-ND; Unit Price: *; Value: 1UF,10V
footprint CAPC2012 (Chip Capacitor, Body 2.0x1.3mm, IPC High Density)
pins: 1, 2

## CP14
designator CP?, comment 100nF/25V
CAP CER 0.1UF 25V X7R 0805; Manufacturer: Yageo; Manufacturer Part Number: CC0805KRX7R8BB104; Package: 0805 (2012 Metric); Supplier: Digi-Key; Supplier Part Number: 311-1141-1-ND; Unit Price: *; Value: 100nF/25V
footprint CAPC2012 (Chip Capacitor, Body 2.0x1.3mm, IPC High Density)
pins: 1, 2

## CP15
designator CP?, comment 1.5nF/50V
1500pF ±5% 50V Ceramic Capacitor C0G, NP0 0805 (2012 Metric); Manufacturer: KEMET; Manufacturer Part Number: C0805C152J5GACTU; Package: 0805 (2012 Metric); Supplier: Digi-Key; Supplier Part Number: 399-8027-1-ND; Unit Price: *; Value: 1.5nF/50V
footprint CAPC2012 (Chip Capacitor, Body 2.0x1.3mm, IPC High Density)
pins: 1, 2

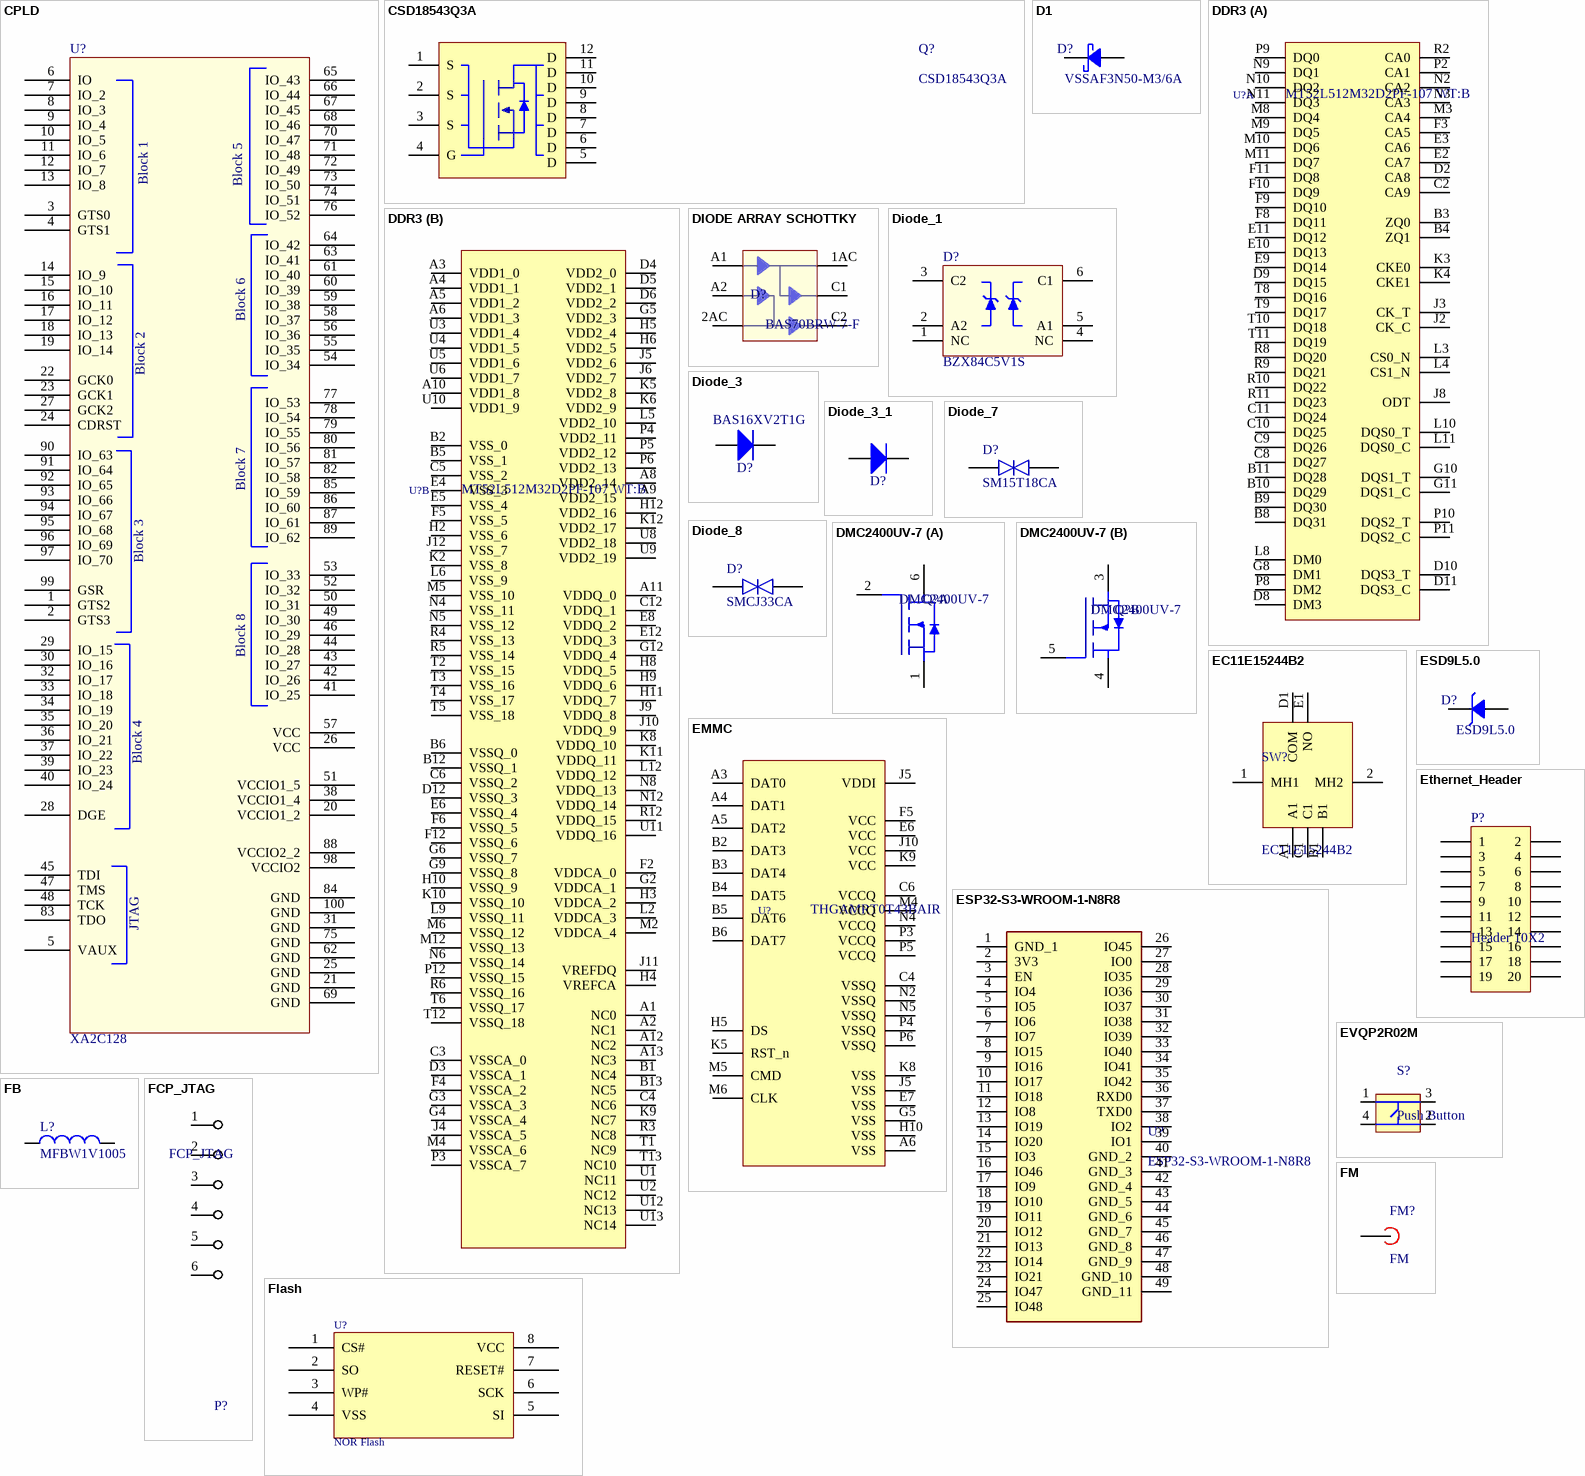
[diagram p7: symbols CPLD to FM]

## CPLD
designator U?, comment XA2C128
IC CPLD 128MC 7NS 100VQFP; Manufacturer: Xilinx Inc.; Manufacturer Part Number: XA2C128-8VQG100Q; Value: XA2C128; Package: 100-TQFP; Supplier: Digi-Key; Supplier Part Number: 122-1701-ND; Operating Temperature: -40°C ~ 105°C (TA)
footprint 100-TQFP (Thin QFP, 100-Leads, Body 14x14mm, Pitch 0.5mm, IPC Medium Density)
pins: 1 GTS2, 2 GTS3, 3 GTS0, 4 GTS1, 5 VAUX (power), 6 IO, 7 IO_2, 8 IO_3, 9 IO_4, 10 IO_5, 11 IO_6, 12 IO_7, 13 IO_8, 14 IO_9, 15 IO_10, 16 IO_11, 17 IO_12, 18 IO_13, 19 IO_14, 20 VCCIO1_2, 21 GND (power), 22 GCK0, 23 GCK1, 24 CDRST, 25 GND (power), 26 VCC, 27 GCK2, 28 DGE, 29 IO_15, 30 IO_16, 31 GND (power), 32 IO_17, 33 IO_18, 34 IO_19, 35 IO_20, 36 IO_21, 37 IO_22, 38 VCCIO1_4, 39 IO_23, 40 IO_24, 41 IO_25, 42 IO_26, 43 IO_27, 44 IO_28, 45 TDI, 46 IO_29, 47 TMS, 48 TCK, 49 IO_30, 50 IO_31, 51 VCCIO1_5, 52 IO_32, 53 IO_33, 54 IO_34, 55 IO_35, 56 IO_36, 57 VCC, 58 IO_37, 59 IO_38, 60 IO_39, 61 IO_40, 62 GND (power), 63 IO_41, 64 IO_42, 65 IO_43, 66 IO_44, 67 IO_45, 68 IO_46, 69 GND (power), 70 IO_47, 71 IO_48, 72 IO_49, 73 IO_50, 74 IO_51, 75 GND (power), 76 IO_52, 77 IO_53, 78 IO_54, 79 IO_55, 80 IO_56, 81 IO_57, 82 IO_58, 83 TDO, 84 GND (power), 85 IO_59, 86 IO_60, 87 IO_61, 88 VCCIO2_2, 89 IO_62, 90 IO_63, 91 IO_64, 92 IO_65, 93 IO_66, 94 IO_67, 95 IO_68, 96 IO_69, 97 IO_70, 98 VCCIO2, 99 GSR, 100 GND (power)
text: Block 1; Block 5; Block 6; Block 2; Block 7; Block 3; Block 8; Block 4; JTAG

## CSD18543Q3A
designator Q?
60-V, N channel NexFETâ„¢ power MOSFET, single SON 3 mm x 3 mm, 9.9 mOhm; MF: Texas Instruments; SPN: C840100; Package: VSONP-8; Value: CSD18543Q3A; MPN: CSD18543Q3A
footprint TRANS_CSD18543Q3A
pins: 1 S, 2 S, 3 S, 4 G, 5 D, 6 D, 7 D, 8 D, 9 D, 10 D, 11 D, 12 D

## D1
designator D?, comment VSSAF3N50-M3/6A
DIODE SCHOTTKY 50V 2.7A DO221AC; Manufacturer: Vishay Semiconductor Diodes Division; Manufacturer Part Number: VSSAF3N50-M3/6A; Package: DO-221AC (SlimSMA); Supplier: Digi-Key; Supplier Part Number: VSSAF3N50-M3/6A-ND; Unit Price: 0.12865; Value: VSSAF3N50-M3/6A
footprint DO-221
pins: 1, 2

## DDR3
designator U?, comment MT52L512M32D2PF-107 WT:B
IC DRAM 16GBIT 933MHZ 178FBGA; Manufacturer: Micron Technology Inc.; Package: 178FBGA; Manufacturer Part Number: MT52L512M32D2PF-107 WT:B; Supplier: Digikey; Supplier Part Number: MT52L512M32D2PF-107WT:B-ND; Temperature: -55 to 155; Value: MT52L512M32D2PF-107 WT:B
footprint DDR3
part A pins: B3 ZQ0, B4 ZQ1, B8 DQ31, B9 DQ30, B10 DQ29, B11 DQ28, C2 CA9, C8 DQ27, C9 DQ26, C10 DQ25, C11 DQ24, D2 CA8, D8 DM3, D9 DQ15, D10 DQS3_T, D11 DQS3_C, E2 CA7, E3 CA6, E9 DQ14, E10 DQ13, E11 DQ12, F3 CA5, F8 DQ11, F9 DQ10, F10 DQ9, F11 DQ8, G8 DM1, G10 DQS1_T, G11 DQS1_C, J2 CK_C, J3 CK_T, J8 ODT, K3 CKE0, K4 CKE1, L3 CS0_N, L4 CS1_N, L8 DM0, L10 DQS0_T, L11 DQS0_C, M3 CA4, M8 DQ4, M9 DQ5, M10 DQ6, M11 DQ7, N2 CA2, N3 CA3, N9 DQ1, N10 DQ2, N11 DQ3, P2 CA1, P8 DM2, P9 DQ0, P10 DQS2_T, P11 DQS2_C, R2 CA0, R8 DQ20, R9 DQ21, R10 DQ22, R11 DQ23, T8 DQ16, T9 DQ17, T10 DQ18, T11 DQ19
part B pins: A1 NC0, A2 NC1, A3 VDD1_0, A4 VDD1_1, A5 VDD1_2, A6 VDD1_3, A8 VDD2_14, A9 VDD2_15, A10 VDD1_8, A11 VDDQ_0, A12 NC2, A13 NC3, B1 NC4, B2 VSS_0, B5 VSS_1, B6 VSSQ_0, B12 VSSQ_1, B13 NC5, C3 VSSCA_0, C4 NC6, C5 VSS_2, C6 VSSQ_2, C12 VDDQ_1, D3 VSSCA_1, D4 VDD2_0, D5 VDD2_1, D6 VDD2_2, D12 VSSQ_3, E4 VSS_3, E5 VSS_4, E6 VSSQ_4, E8 VDDQ_2, E12 VDDQ_3, F2 VDDCA_0, F4 VSSCA_2, F5 VSS_5, F6 VSSQ_5, F12 VSSQ_6, G2 VDDCA_1, G3 VSSCA_3, G4 VSSCA_4, G5 VDD2_3, G6 VSSQ_7, G9 VSSQ_8, G12 VDDQ_4, H2 VSS_6, H3 VDDCA_2, H4 VREFCA, H5 VDD2_4, H6 VDD2_5, H8 VDDQ_5, H9 VDDQ_6, H10 VSSQ_9, H11 VDDQ_7, H12 VDD2_16, J4 VSSCA_5, J5 VDD2_6, J6 VDD2_7, J9 VDDQ_8, J10 VDDQ_9, J11 VREFDQ, J12 VSS_7, K2 VSS_8, K5 VDD2_8, K6 VDD2_9, K8 VDDQ_10, K9 NC7, K10 VSSQ_10, K11 VDDQ_11, K12 VDD2_17, L2 VDDCA_3, L5 VDD2_10, L6 VSS_9, L9 VSSQ_11, L12 VDDQ_12, M2 VDDCA_4, M4 VSSCA_6, M5 VSS_10, M6 VSSQ_12, M12 VSSQ_13, N4 VSS_11, N5 VSS_12, N6 VSSQ_14, N8 VDDQ_13, N12 VDDQ_14, P3 VSSCA_7, P4 VDD2_11, P5 VDD2_12, P6 VDD2_13, P12 VSSQ_15, R3 NC8, R4 VSS_13, R5 VSS_14, R6 VSSQ_16, R12 VDDQ_15, T1 NC9, T2 VSS_15, T3 VSS_16, T4 VSS_17, T5 VSS_18, T6 VSSQ_17, T12 VSSQ_18, T13 NC10, U1 NC11, U2 NC12, U3 VDD1_4, U4 VDD1_5, U5 VDD1_6, U6 VDD1_7, U8 VDD2_18, U9 VDD2_19, U10 VDD1_9, U11 VDDQ_16, U12 NC13, U13 NC14

## DIODE ARRAY SCHOTTKY
designator D?, comment BAS70BRW-7-F
DIODE ARRAY SCHOTTKY 70V SOT363; Manufacturer: Diodes Incorporated; Manufacturer Part Number: BAS70BRW-7-F; Package: SOT-363; Supplier: Digi-Key; Supplier Part Number: BAS70BRW-7FDICT-ND; Value: BAS70BRW-7-F
footprint diode array
pins: 1AC, 2AC, A1, A2, C1, C2

## Diode_1
designator D?, comment BZX84C5V1S
BZX84C5V1S, DIODE ZENER ARRAY 5.1V SOT363; Manufacturer: Diodes Incorporated; Manufacturer Part Number: BZX84C5V1S-7-F; Package: SOT-363; Supplier: Digi-Key; Supplier Part Number: BZX84C5V1S-FDICT-ND; Value: BZX84C5V1S; Operating Temperature: -65°C ~ 150°C
footprint SOT-363
pins: 1 NC, 2 A2, 3 C2, 4 NC, 5 A1, 6 C1

## Diode_3
designator D?, comment BAS16XV2T1G
DIODE GEN PURP 100V 200MA SOD523; Manufacturer: ON Semiconductor; Manufacturer Part Number: BAS16XV2T1G; Package: SOD-523; Supplier: Digi-Key; Supplier Part Number: BAS16XV2T1GOSTR-ND; Unit Price: *; Value: BAS16XV2T1G
footprint SOD523 (SODFL, 2-Leads, Body 0.80x1.60mm, IPC Medium Density)
pins: 1 A, 2 K

## Diode_3_1
designator D?, comment 100V  (value not drawn)
Diodes - General Purpose, Power, Switching Signal or Computer Diode; Manufacturer: Microsemi; Manufacturer Part Number: JAN1N4148UR-1; Package: DO-213AA; Supplier: Mouser; Supplier Part Number: 494-JAN1N4148UR-1; Unit Price: *; Value: 100V
footprint DO-213AA
pins: 1 A, 2 K

## Diode_7
designator D?, comment SM15T18CA
Bidirectional Diode TVS DIODE 15.3VWM 25.2VC SMC; Manufacturer Part Number: SM15T18CA-E3/57T; Manufacturer: Vishay Semiconductor Diodes Division; Supplier Part Number: SM15T18CA-E3/57TGITR-ND; Supplier: Digi-Key; Package: DO-214AB, SMC; Value: SM15T18CA; Operating Temperature: -65°C ~ 150°C (TJ); Supplier Availability: Active
footprint SM15T18CA-E3/57T
pins: 1, 2

## Diode_8
designator D?, comment SMCJ33CA
ESD Suppressors / TVS Diodes 1500W 33V Bidirect; Manufacturer Part Number: SMCJ33CA-E3/9AT; Manufacturer: Vishay Semiconductor Diodes Division; Supplier Part Number: 625-SMCJ33CA-E3/9AT; Supplier: Mouser; Package: DO-214AB; Value: SMCJ33CA; Operating Temperature: -55°C ~ 150°C; Supplier Availability: Active
footprint SM15T18CA-E3/57T
pins: 1, 2

## DMC2400UV-7
designator Q?
MOSFET N/P-CH 20V SOT563; Manufacturer: Diodes Incorporated; Manufacturer Part Number: DMC2400UV-7; Package: SOT563; Supplier: Digi-Key; Supplier Part Number: DMC2400UV-7DICT-ND; Value: DMC2400UV-7
footprint SOT563
part A pins: 1 S, 2 G, 6 D
part B pins: 3 D, 4 S, 5 G

## EC11E15244B2
designator SW?
Through Hole Encoders RoHS; MF: ALPS Electric; LCSC: C470754; MPN: EC11E15244B2; Package: https://tech.alpsalpine.com/e/products/detail/EC11E15244B2/
footprint EC11E15244B2
pins: 1 MH1, 2 MH2, A1, B1, C1, D1 COM, E1 NO

## EMMC
designator U?, comment THGAMRT0T43BAIR
FLASH - NAND Memory IC 1Tb (128G x 8) eMMC   153-FBGA (11.5x13); Manufacturer: Kioxia America, Inc.; Package: 153-FBGA (11.5x13); Manufacturer Part Number: THGAMRT0T43BAIR; Supplier: Digikey; Supplier Part Number: THGAMRT0T43BAIR-ND; Temperature: -55 to 155; Value: THGAMRT0T43BAIR
pins: A3 DAT0, A4 DAT1, A5 DAT2, A6 VSS, B2 DAT3, B3 DAT4, B4 DAT5, B5 DAT6, B6 DAT7, C4 VSSQ, C6 VCCQ, E6 VCC, E7 VSS, F5 VCC, G5 VSS, H5 DS, H10 VSS, J5 VSS, J5 VDDI, J10 VCC, K5 RST_n, K8 VSS, K9 VCC, M4 VCCQ, M5 CMD, M6 CLK, N2 VSSQ, N4 VCCQ, N5 VSSQ, P3 VCCQ, P4 VSSQ, P5 VCCQ, P6 VSSQ

## ESD9L5.0
designator D?
SOD-923 Electrostatic and Surge Protection (TVS/ESD) ROHS; Manufacturer: Wild Goose; Manufacturer Part Number: ESD9L5.0; Package: SOD-923; Supplier: LCSC; Supplier Part Number: C22368686; Value: ESD9L5.0
pins: 1, 2

## ESP32-S3-WROOM-1-N8R8
designator U?
Multiprotocol Modules SMD module, ESP32-S3R8 with 8 MB Octal PSRAM die inside, 8 MB Quad SPI flash, PCB antenna; Manufacturer: Espressif Systems; SPN: 356-EP32S3WROOM1N8R8; MPN: ESP32-S3-WROOM-1-N8R8; Package: SMD; Supplier: Mouser; Value: ESP32-S3-WROOM-1-N8R8
footprint ESP32S3WROOM1N8R8
pins: 1 GND_1, 2 3V3, 3 EN, 4 IO4, 5 IO5, 6 IO6, 7 IO7, 8 IO15, 9 IO16, 10 IO17, 11 IO18, 12 IO8, 13 IO19, 14 IO20, 15 IO3, 16 IO46, 17 IO9, 18 IO10, 19 IO11, 20 IO12, 21 IO13, 22 IO14, 23 IO21, 24 IO47, 25 IO48, 26 IO45, 27 IO0, 28 IO35, 29 IO36, 30 IO37, 31 IO38, 32 IO39, 33 IO40, 34 IO41, 35 IO42, 36 RXD0, 37 TXD0, 38 IO2, 39 IO1, 40 GND_2, 41 GND_3, 42 GND_4, 43 GND_5, 44 GND_6, 45 GND_7, 46 GND_8, 47 GND_9, 48 GND_10, 49 GND_11

## Ethernet_Header
designator P?, comment Header 10X2
Manufacturer: Harwin; Manufacturer Part Number: M50-3611042; Package: SMD; Supplier: Mouser; Supplier Part Number: 855-M50-3611042; Value: Header 10X2; Operating Temperature: -55°C ~ 105°C
pins: 1, 2, 3, 4, 5, 6, 7, 8, 9, 10, 11, 12, 13, 14, 15, 16, 17, 18, 19, 20

## EVQP2R02M
designator S?, comment Push Button
-40℃~+85℃ 1,000,000 Cycles 1.6N 15V 2.1mm 20mA 3.5mm 4.7mm J-Lead Rectangular Button SPST Surface Mount,Vertical SMD,3.5x4.7mm Tactile Switches ROHS; Manufacturer: PANASONIC; MPN: EVQP2R02M; SPN: C79161; Value: Push Button; Package: SMD,3.5x4.7mm; Supplier: LCSC
footprint EVQ
pins: 1, 2, 3, 4

## FB
designator L?, comment MFBW1V1005
FIXED IND 0 800MA 0402; Manufacturer: Eaton - Electronics Division; Manufacturer Part Number: MFBW1V1005-000-R; Package: 0402; Supplier: Digi-Key; Supplier Part Number: 283-MFBW1V1005-000-RTR-ND; Value: MFBW1V1005
footprint CAP 0402/1005 (Chip Capacitor, 2-Leads, Body 1.02x0.51mm, IPC Medium Density)
pins: 1, 2

## FCP_JTAG
designator P?
Header 1x6; Value: FCP_JTAG; Supplier Partnumber: S9014E-06-ND
footprint FCP_JTAG
pins: 1, 2, 3, 4, 5, 6

## Flash
designator U?, comment NOR Flash
NOR Flash Nor; Manufacturer: Cypress Semiconductor; Manufacturer Part Number: S25FL064LABMFM010; Value: NOR Flash; Package: SOIC-8; Supplier: Mouser; Supplier Part Number: 727-S25FL064LABFM010
footprint 8-SOIC
pins: 1 CS#, 2 SO, 3 WP#, 4 VSS, 5 SI, 6 SCK, 7 RESET#, 8 VCC

## FM
designator FM?  (no BOM)
Test Pin; Value: FM
footprint FM
pins: 1

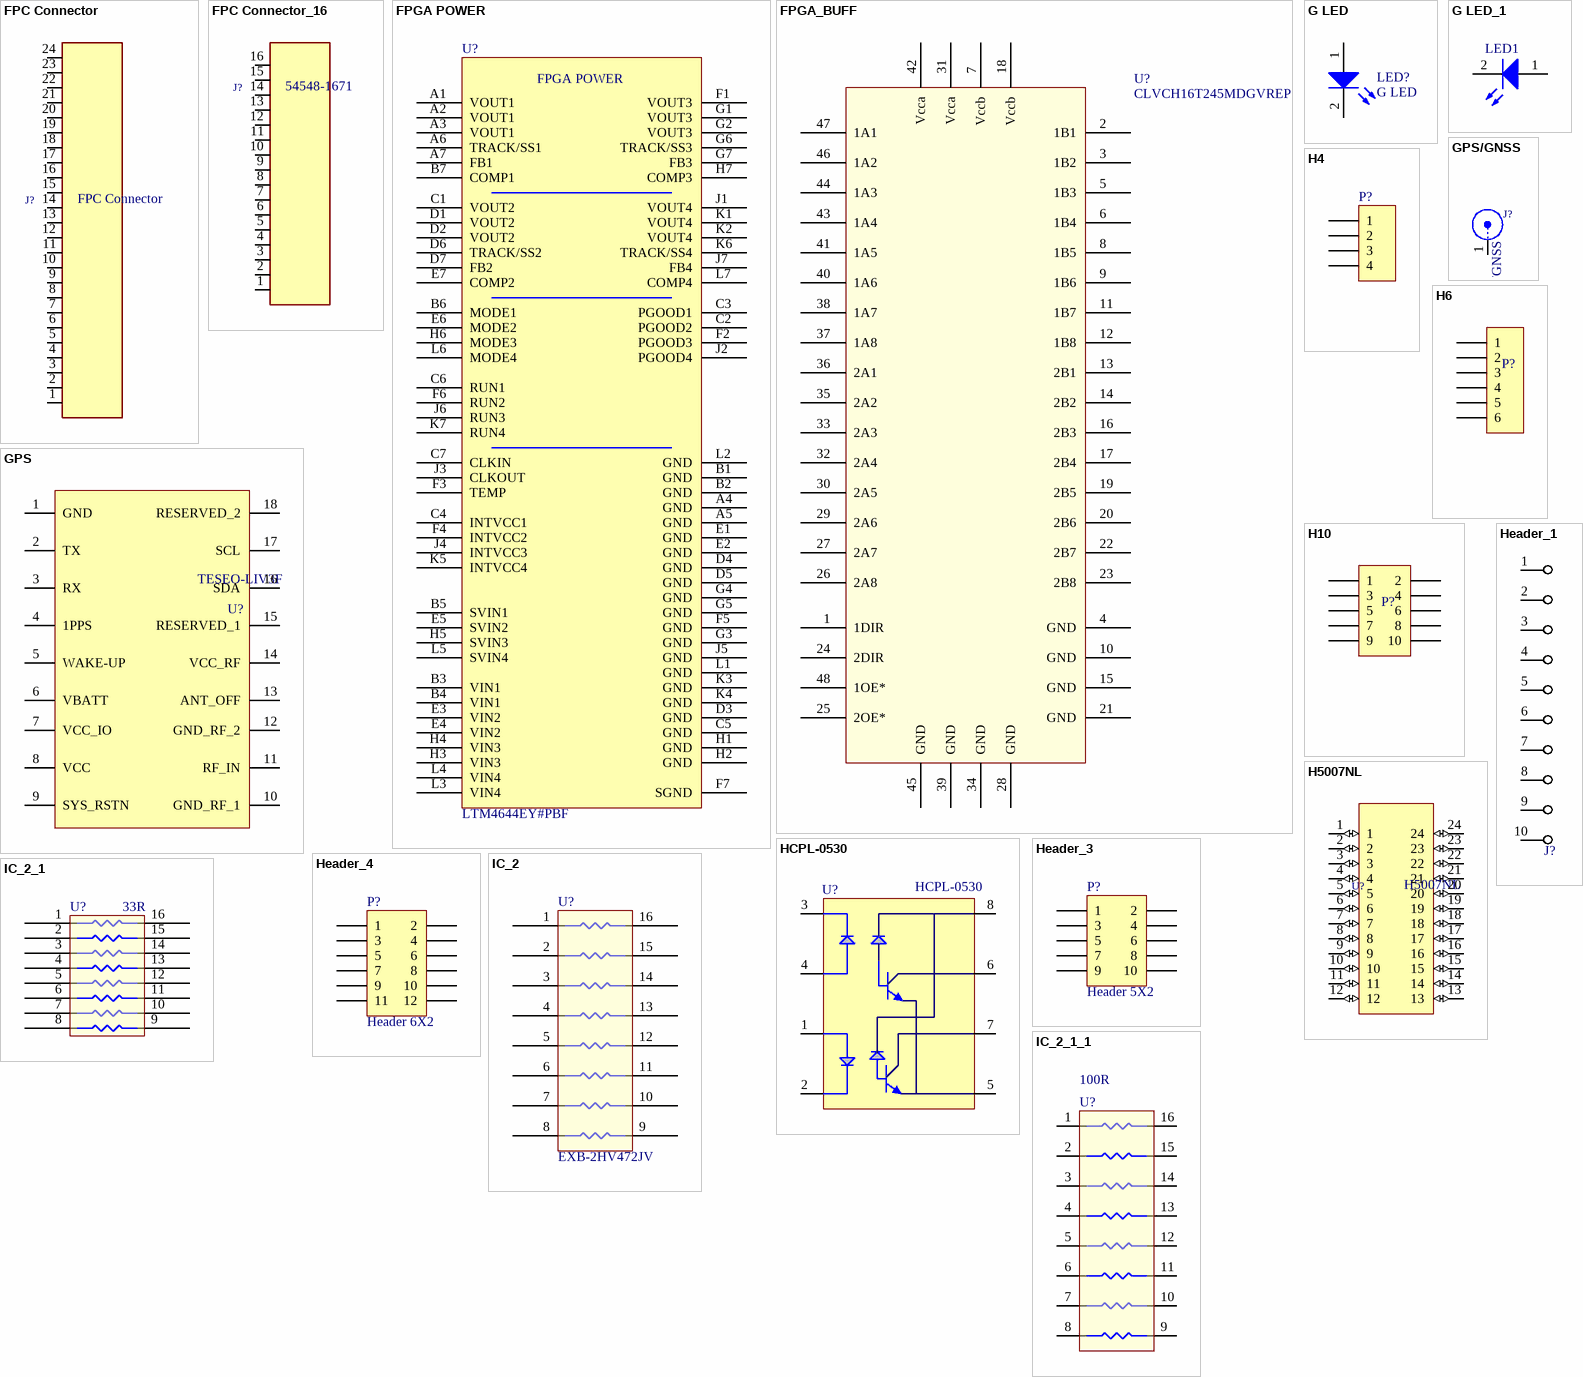
[diagram p8: symbols FPC Connector to IC_2_1_1]

## FPC Connector
designator J?
FFC & FPC Connectors WR-FPC SMT Horiztl .50mm Top Cont 24P; Manufacturer: Wurth Elektronik; Manufacturer Part Number: 687124183622; Package: FPC Connector; Supplier: Mouser; Supplier Part Number: 710-687124183622; Temperature: -55 to 155; Value: FPC Connector
footprint FPC Connector
pins: 1 24, 2 23, 3 22, 4 21, 5 20, 6 19, 7 18, 8 17, 9 16, 10 15, 11 14, 12 13, 13 12, 14 11, 15 10, 16 9, 17 8, 18 7, 19 6, 20 5, 21 4, 22 3, 23 2, 24 1

## FPC Connector_16
designator J?, comment 54548-1671
FFC & FPC Connectors 0.5 FPC ZIF Hsg Assy ssy 16Ckt EmbsTp Pkg; Manufacturer: Molex; Package: FPC Connector; Manufacturer Part Number: 54548-1671; Supplier: Mouser; Supplier Part Number: 538-54548-1671; Temperature: -55 to 155; Value: 54548-1671
pins: 1 24, 2 23, 3 22, 4 21, 5 20, 6 19, 7 18, 8 17, 9 16, 10 15, 11 14, 12 13, 13 12, 14 11, 15 10, 16 9

## FPGA POWER
designator U?, comment LTM4644EY#PBF
Power IC; Manufacturer: Analog Devices; Manufacturer Part Number: LTM4644EY#PBF; Package: 77-BBGA; Supplier: Digi-Key; Supplier Part Number: LTM4644EY#PBF-ND; Temperature: -40°C ~ 125°C; Value: LTM4644EY#PBF
footprint LTM4644 (FPGA Power)
pins: A1 VOUT1, A2 VOUT1, A3 VOUT1, A4 GND, A5 GND, A6 TRACK/SS1, A7 FB1, B1 GND, B2 GND, B3 VIN1, B4 VIN1, B5 SVIN1, B6 MODE1, B7 COMP1, C1 VOUT2, C2 PGOOD2, C3 PGOOD1, C4 INTVCC1, C5 GND, C6 RUN1, C7 CLKIN, D1 VOUT2, D2 VOUT2, D3 GND, D4 GND, D5 GND, D6 TRACK/SS2, D7 FB2, E1 GND, E2 GND, E3 VIN2, E4 VIN2, E5 SVIN2, E6 MODE2, E7 COMP2, F1 VOUT3, F2 PGOOD3, F3 TEMP, F4 INTVCC2, F5 GND, F6 RUN2, F7 SGND, G1 VOUT3, G2 VOUT3, G3 GND, G4 GND, G5 GND, G6 TRACK/SS3, G7 FB3, H1 GND, H2 GND, H3 VIN3, H4 VIN3, H5 SVIN3, H6 MODE3, H7 COMP3, J1 VOUT4, J2 PGOOD4, J3 CLKOUT, J4 INTVCC3, J5 GND, J6 RUN3, J7 FB4, K1 VOUT4, K2 VOUT4, K3 GND, K4 GND, K5 INTVCC4, K6 TRACK/SS4, K7 RUN4, L1 GND, L2 GND, L3 VIN4, L4 VIN4, L5 SVIN4, L6 MODE4, L7 COMP4

## FPGA_BUFF
designator U?, comment CLVCH16T245MDGVREP
Translation - Voltage Levels EP 16B LEVEL TRANSL; Manufacturer: Texas Instruments; Value: CLVCH16T245MDGVREP; Package: TVSOP-48; Manufacturer Part Number: CLVCH16T245MDGVREP; Supplier: Mouser; Supplier Part Number: 595-VCH16T245MDGVREP; Operating Temperature: -55°C ~ 125°C
footprint TVSOP-48
pins: 1 1DIR, 2 1B1, 3 1B2, 4 GND, 5 1B3, 6 1B4, 7 Vccb, 8 1B5, 9 1B6, 10 GND, 11 1B7, 12 1B8, 13 2B1, 14 2B2, 15 GND, 16 2B3, 17 2B4, 18 Vccb, 19 2B5, 20 2B6, 21 GND, 22 2B7, 23 2B8, 24 2DIR, 25 2OE*, 26 2A8, 27 2A7, 28 GND, 29 2A6, 30 2A5, 31 Vcca, 32 2A4, 33 2A3, 34 GND, 35 2A2, 36 2A1, 37 1A8, 38 1A7, 39 GND, 40 1A6, 41 1A5, 42 Vcca, 43 1A4, 44 1A3, 45 GND, 46 1A2, 47 1A1, 48 1OE*

## G LED
designator LED?
LED GREEN CLEAR CHIP SMD; Manufacturer: Lite-On Inc.; Manufacturer Part Number: LTST-C190GKT; Package: 0603 (1608 Metric); Value: G LED; Operating Temperature: -40°C ~ 100°C
pins: 1 A, 2 K

## G LED_1
designator LED1
LED GREEN CLEAR CHIP SMD; Manufacturer: TOGIALED; Manufacturer Part Number: TJ-S1005SW4TGLC7K-A5; SPN: C273601; Package: 0402; Operating Temperature: -40°C ~ 100°C; Supplier: LCSC
footprint LED 0402/1005 (Chip Capacitor, 2-Leads, Body 1.02x0.51mm, IPC Medium Density)
pins: 1 A, 2 K

## GPS
designator U?, comment TESEO-LIV3F
GPS Modules ADS INFOTAINMENT; Manufacturer: STMicroelectronics; Manufacturer Part Number: TESEO-LIV3F; Package: SMD; Supplier: mouser; Supplier Part Number: 511-TESEO-LIV3F; Value: TESEO-LIV3F
pins: 1 GND, 2 TX, 3 RX, 4 1PPS, 5 WAKE-UP, 6 VBATT, 7 VCC_IO, 8 VCC, 9 SYS_RSTN, 10 GND_RF_1, 11 RF_IN, 12 GND_RF_2, 13 ANT_OFF, 14 VCC_RF, 15 RESERVED_1, 16 SDA, 17 SCL, 18 RESERVED_2

## GPS/GNSS
designator J?
Ceramics GNSS GPS BD antenna; Manufacturer: TD Antenna; Package: TH; MPN: TDA-1341; Supplier: Alibaba; SPN: https://www.alibaba.com/product-detail/Internal-PCB-Welding-25x25mm-2mm-4mm_1600343708412.html; Temperature: -55 to 155; Value: GPS/GNSS
pins: 1

## H4
designator P?
Header 4
pins: 1, 2, 3, 4

## H6
designator P?
Header 6
pins: 1, 2, 3, 4, 5, 6

## H10
designator P?
Header 10
pins: 1, 2, 3, 4, 5, 6, 7, 8, 9, 10

## H5007NL
designator U?
MODULE SINGLE GIGABIT LAN 24SOIC; Manufacturer: Pulse Electronics Network; Package: SMD; Manufacturer Part Number: H5007NL; Supplier: Digikey; Supplier Part Number: 553-1334-ND; Temperature: -55 to 155; Value: H5007NL
pins: 1 (io), 2 (io), 3 (io), 4 (io), 5 (io), 6 (io), 7 (io), 8 (io), 9 (io), 10 (io), 11 (io), 12 (io), 13 (io), 14 (io), 15 (io), 16 (io), 17 (io), 18 (io), 19 (io), 20 (io), 21 (io), 22 (io), 23 (io), 24 (io)

## HCPL-0530
designator U?
OPTOISO 3.75KV 2CH TRANS 8SOIC; Manufacturer: Broadcom Limited; Manufacturer Part Number: HCPL-0530-000E; Package: 8-SOIC (0.154", 3.90mm Width); Supplier: Digi-Key; Supplier Part Number: 516-1631-5-ND; Unit Price: *; Value: HCPL-0530
footprint SOIC-8
pins: 1, 2, 3, 4, 5, 6, 7, 8

## Header_1
designator J?, comment Header 1x10  (value not drawn)
Value: Header 1x10; Supplier Partnumber: S9015E-05-ND
footprint Header-10Pin - 1.27 - 2 Rows
pins: 1, 2, 3, 4, 5, 6, 7, 8, 9, 10

## Header_3
designator P?, comment Header 5X2
Manufacturer: Samtec Inc.; Manufacturer Part Number: FTE-105-03-G-DV-TR; Package: SMD; Supplier: Digi-Key; Supplier Part Number: 612-FTE-105-03-G-DV-TR-ND; Value: Header 5X2; Operating Temperature: -55°C ~ 105°C
footprint 10PIN-0.8mm
pins: 1, 2, 3, 4, 5, 6, 7, 8, 9, 10

## Header_4
designator P?, comment Header 6X2
Manufacturer: Samtec Inc.; Manufacturer Part Number: FTE-106-03-G-DV-TR; Package: SMD; Supplier: Digi-Key; Supplier Part Number: 612-FTE-106-03-G-DV-CT-ND; Value: Header 6X2; Operating Temperature: -55°C ~ 105°C
footprint 12PIN-0.8mm
pins: 1, 2, 3, 4, 5, 6, 7, 8, 9, 10, 11, 12

## IC_2
designator U?, comment EXB-2HV472JV
RES ARRAY 8 RES 4.7K OHM 1506; Manufacturer: Panasonic Electronic Components; Value: EXB-2HV472JV; Package: 1506; Manufacturer Part Number: EXB-2HV472JV; Supplier: Digikey; Supplier Part Number: Y1472CT-ND; Operating Temperature: -55°C ~ 125°C
footprint EXB-2HV472JV
pins: 1, 2, 3, 4, 5, 6, 7, 8, 9, 10, 11, 12, 13, 14, 15, 16